# Altium schematic symbol library DRV8428EPWPR.SchLib: 1 symbol
Pins are listed as number, name and electrical type; pins without a type are passive.

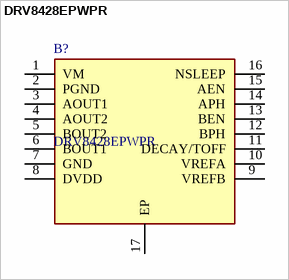
[diagram p0: symbol DRV8428EPWPR]

## DRV8428EPWPR
designator B?
Manufacturer_Name: Texas Instruments; Geometry.Height: 1.2mm; Manufacturer_Part_Number: DRV8428EPWPR; Mouser Part Number: 595-DRV8428EPWPR; Mouser Price/Stock: https://www.mouser.co.uk/ProductDetail/Texas-Instruments/DRV8428EPWPR?qs=81r%252BiQLm7BQM1fLIOdEEqA%3D%3D; Arrow Part Number: DRV8428EPWPR; Arrow Price/Stock: https://www.arrow.com/en/products/drv8428epwpr/texas-instruments?region=nac; Description: DRV8428EPWPR; Datasheet Link: https://www.ti.com/lit/ds/symlink/drv8428e.pdf
footprint SOP65P640X120-17N
pins: 1 VM, 2 PGND, 3 AOUT1, 4 AOUT2, 5 BOUT2, 6 BOUT1, 7 GND, 8 DVDD, 9 VREFB, 10 VREFA, 11 DECAY/TOFF, 12 BPH, 13 BEN, 14 APH, 15 AEN, 16 NSLEEP, 17 EP